# Altium footprint library AVP32F08_EVM_Rev1.1.PcbLib: 50 footprints (part 2 of 4)
Each footprint in its own frame and in the unit in brackets; x right, y up, seen from the top. Pads: shape width x height; smd on the part's side, far side on the other; paste and mask are expansions set on the pad; w line width, h text height; cw(c..) or ccw(c..) is an arc to the next point about the centre after c.
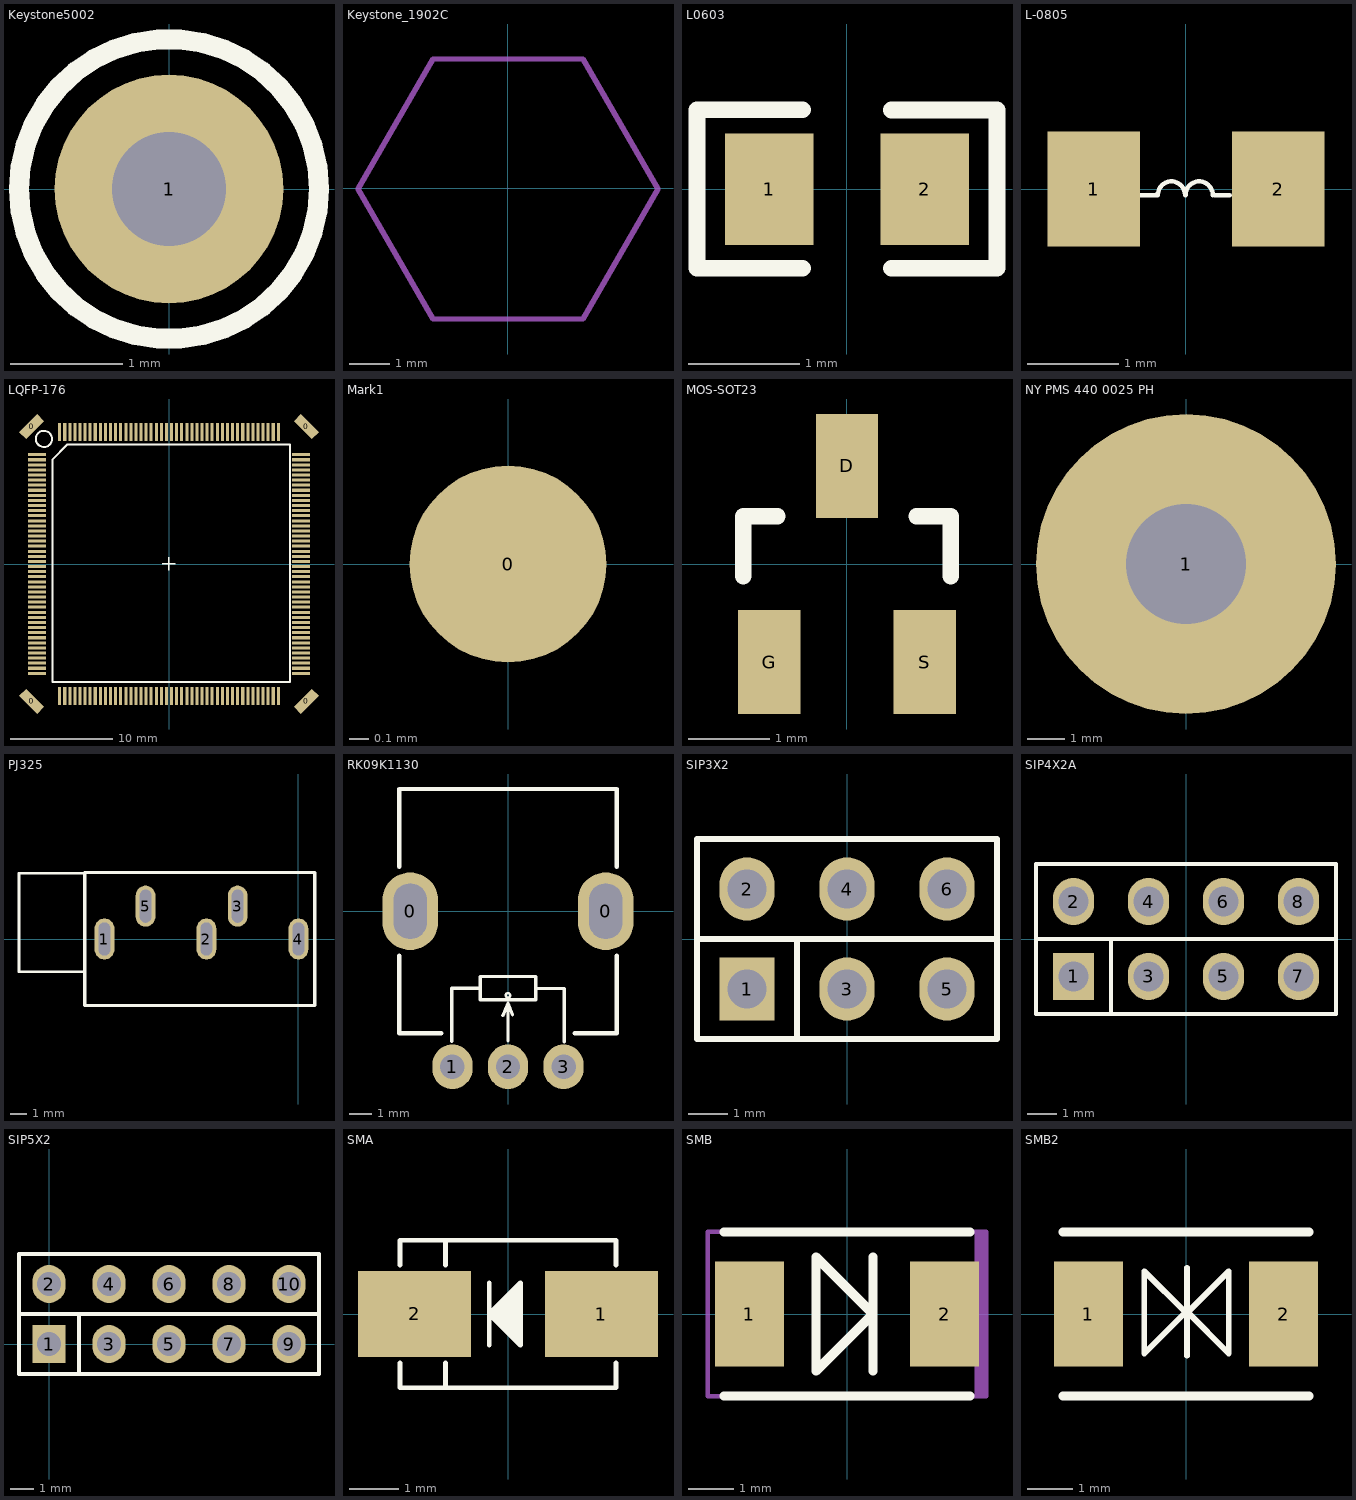
[diagram p1: the footprints below, top view; thin cyan lines are the x and y axes]

## Keystone5002 [mil] "测试点"
pads (1):
  round 80 hole 40: 1(0,0)
Top Overlay:
  circle w7: c0,0 r52.5
Mechanical 5:
  circle w3.94: c0,0 r52.5
3D body "Keystone_5002.stp": height 181.97, standoff -118.11, extent -49.23,-49 49,49.04

## Keystone_1902C [mil] "Hex Standoff, 4-40 threaded, nylon"
height 500
pads (1):
  round 1 on Mech4: 0(0,0)
Mechanical 6:
  lines w5: -145.29,-0.49 -72.56,125.49 72.92,125.49 145.65,-0.49 72.92,-126.47 -72.56,-126.47 -145.29,-0.49
3D body "Keystone_1902C.stp": height 501, standoff 1, extent -144.95,-125.98 146,125.98

## L0603 [mm] "标准型 间距1.4mm  焊盘尺寸0.8/1mm"
pads (2):
  rect 0.8x1 smd mask+0.102: 1(-0.7,0) 2(0.7,0)
Top Overlay:
  lines w0.15: -0.4,-0.711 -1.35,-0.711 -1.35,0.716 -0.4,0.716 ; 0.4,-0.711 1.35,-0.711 1.35,0.713 0.4,0.713
3D body "User Library-V0603HD.STEP": height 0.9, standoff 0, extent -0.775,-0.4 0.825,0.4

## L-0805 [mil] "标准型  间距40mil 电感"
height 196.85
pads (2):
  rect 40x50 smd: 1(-40,0) 2(40,0)
Top Overlay:
  lines w1.97: -20,-2.61 -13,-2.61 ; -12.22,-2.62 cw(c-6.32,-2.62) -0.41,-2.62 ; -0.22,-2.62 cw(c5.68,-2.62) 11.59,-2.62 ; 12.53,-2.61 19,-2.61
3D body "User Library-Ferrite Beads(BLM21PG221SZ1D).step": height 36.42, standoff 2.95, extent -39.36,-25.6 39.37,23.61

## LQFP-176 [mm] "0.5mm pitch"
pads (180):
  rect 2.5x1 smd rot 135: 0(-13.5,-13.5) 0(13.5,13.5)
  rect 2.5x1 smd rot 45: 0(-13.5,13.5) 0(13.5,-13.5)
  rect 1.778x0.3 smd mask+0.05: 1(-13,10.75) 2(-13,10.25) 3(-13,9.75) 4(-13,9.25) 5(-13,8.75) 6(-13,8.25) 7(-13,7.75) 8(-13,7.25) 9(-13,6.75) 10(-13,6.25) 11(-13,5.75) 12(-13,5.25) 13(-13,4.75) 14(-13,4.25) 15(-13,3.75) 16(-13,3.25) 17(-13,2.75) 18(-13,2.25) 19(-13,1.75) 20(-13,1.25) 21(-13,0.75) 22(-13,0.25) 23(-13,-0.25) 24(-13,-0.75) 25(-13,-1.25) 26(-13,-1.75) 27(-13,-2.25) 28(-13,-2.75) 29(-13,-3.25) 30(-13,-3.75) 31(-13,-4.25) 32(-13,-4.75) 33(-13,-5.25) 34(-13,-5.75) 35(-13,-6.25) 36(-13,-6.75) 37(-13,-7.25) 38(-13,-7.75) 39(-13,-8.25) 40(-13,-8.75) 41(-13,-9.25) 42(-13,-9.75) 43(-13,-10.25) 44(-13,-10.75) 89(13,-10.75) 90(13,-10.25) 91(13,-9.75) 92(13,-9.25) 93(13,-8.75) 94(13,-8.25) 95(13,-7.75) 96(13,-7.25) 97(13,-6.75) 98(13,-6.25) 99(13,-5.75) 100(13,-5.25) 101(13,-4.75) 102(13,-4.25) 103(13,-3.75) 104(13,-3.25) 105(13,-2.75) 106(13,-2.25) 107(13,-1.75) 108(13,-1.25) 109(13,-0.75) 110(13,-0.25) 111(13,0.25) 112(13,0.75) 113(13,1.25) 114(13,1.75) 115(13,2.25) 116(13,2.75) 117(13,3.25) 118(13,3.75) 119(13,4.25) 120(13,4.75) 121(13,5.25) 122(13,5.75) 123(13,6.25) 124(13,6.75) 125(13,7.25) 126(13,7.75) 127(13,8.25) 128(13,8.75) 129(13,9.25) 130(13,9.75) 131(13,10.25) 132(13,10.75)
  rect 0.3x1.778 smd mask+0.05: 45(-10.75,-13) 46(-10.25,-13) 47(-9.75,-13) 48(-9.25,-13) 49(-8.75,-13) 50(-8.25,-13) 51(-7.75,-13) 52(-7.25,-13) 53(-6.75,-13) 54(-6.25,-13) 55(-5.75,-13) 56(-5.25,-13) 57(-4.75,-13) 58(-4.25,-13) 59(-3.75,-13) 60(-3.25,-13) 61(-2.75,-13) 62(-2.25,-13) 63(-1.75,-13) 64(-1.25,-13) 65(-0.75,-13) 66(-0.25,-13) 67(0.25,-13) 68(0.75,-13) 69(1.25,-13) 70(1.75,-13) 71(2.25,-13) 72(2.75,-13) 73(3.25,-13) 74(3.75,-13) 75(4.25,-13) 76(4.75,-13) 77(5.25,-13) 78(5.75,-13) 79(6.25,-13) 80(6.75,-13) 81(7.25,-13) 82(7.75,-13) 83(8.25,-13) 84(8.75,-13) 85(9.25,-13) 86(9.75,-13) 87(10.25,-13) 88(10.75,-13) 133(10.75,13) 134(10.25,13) 135(9.75,13) 136(9.25,13) 137(8.75,13) 138(8.25,13) 139(7.75,13) 140(7.25,13) 141(6.75,13) 142(6.25,13) 143(5.75,13) 144(5.25,13) 145(4.75,13) 146(4.25,13) 147(3.75,13) 148(3.25,13) 149(2.75,13) 150(2.25,13) 151(1.75,13) 152(1.25,13) 153(0.75,13) 154(0.25,13) 155(-0.25,13) 156(-0.75,13) 157(-1.25,13) 158(-1.75,13) 159(-2.25,13) 160(-2.75,13) 161(-3.25,13) 162(-3.75,13) 163(-4.25,13) 164(-4.75,13) 165(-5.25,13) 166(-5.75,13) 167(-6.25,13) 168(-6.75,13) 169(-7.25,13) 170(-7.75,13) 171(-8.25,13) 172(-8.75,13) 173(-9.25,13) 174(-9.75,13) 175(-10.25,13) 176(-10.75,13)
Top Overlay:
  circle w0.2: c-12.3,12.3 r0.8
  lines w0.127: -0.641,0.006 0.629,0.006 ; -0.006,-0.629 -0.006,0.641
  lines w0.203: -11.476,-11.602 -11.476,10.266 -9.976,11.766 11.892,11.766 11.892,-11.602 -11.476,-11.602
3D body "User Library-LQFP176-0_5.STEP": height 1.55, standoff -0.02, extent -12.903,-12.878 12.869,12.894

## Mark1 [mm] "基准点 无边框"
pads (1):
  round 1 all layers, no hole: 0(0,0)
Top Solder:
  circle w0.5: c0,0 r0.762
Bottom Solder:
  circle w0.5: c0,0 r0.762

## MOS-SOT23 [mm] "焊盘加长型"
height 2
pads (3):
  rect 0.762x1.27 smd: D(0,1.2) G(-0.95,-1.2) S(0.95,-1.2)
Top Overlay:
  lines w0.2: -1.27,-0.15 -1.27,0.584 -0.85,0.584 ; 0.85,0.584 1.27,0.584 1.27,-0.15
3D body "SOT-23-3.STEP": height 1.2, standoff 0, extent -1.45,-1.502 1.45,1.298

## NY PMS 440 0025 PH [mm] "4-40 nylon screw and mounting hole"
height 1.905
pads (1):
  round 8 hole 3.2: 1(0,0)
Mechanical 5:
  circle w0.127: c0,0 r3.789
3D body "B_F_NY PMS 440 0025 PH.stp": height 2.69, standoff -8.74, extent -3.302,-3.3 3.296,3.3

## PJ325 [mm]
height 1.2
pads (5):
  oval 1.2x2.5 hole 0.7 slot 2 at 90 deg: 1(-11.8,0) 2(-5.6,0) 3(-3.7,2) 4(0,0) 5(-9.3,2)
Top Overlay:
  lines w0.152: -13,-2 -17,-2 -17,4 -13,4
  lines w0.203: -13,-4.05 1,-4.05 1,4.05 -13,4.05 -13,-4.05
3D body "sj-3598.stp": height 13.3, standoff -2.5, extent -17.392,-4.259 0.97,4.041

## RK09K1130 [mm] "立式可调电位器"
height 9.5
pads (5):
  oval 2.5x3.5 hole 1.5 slot 2.5 at 90 deg: 0(-4.4,0) 0(4.4,0)
  oval 1.8x2 hole 1.1: 1(-2.5,-7) 2(0,-7) 3(2.5,-7)
Top Overlay:
  circle w0.1: c-0.002,-3.784 r0.1
  lines w0.15: -2.525,-5.857 -2.525,-3.469 -1.247,-3.469 -1.247,-2.941 1.243,-2.941 1.243,-3.982 -1.247,-3.982 -1.247,-3.474 ; -0.231,-4.693 -0.002,-4.135 ; -0.002,-5.836 -0.002,-4.135 ; 0.201,-4.668 -0.002,-4.135 ; 1.243,-3.474 2.538,-3.474 ; 2.529,-5.882 2.529,-3.495
  lines w0.2: -4.9,-2 -4.9,-5.5 -3,-5.5 ; -4.9,2 -4.9,5.5 4.863,5.5 4.877,5.486 4.886,5.486 4.9,5.5 4.9,2 ; 3,-5.5 4.9,-5.5 4.9,-2
3D body "User Library-RK09K1130-20-1.step": height 19.5, standoff -4.2, extent -5.698,-7.152 5.698,5.498

## SIP3X2 [mm]
pads (6):
  rect 1.4x1.6 hole 1: 1(-2.54,-1.27)
  oval 1.4x1.6 hole 1: 2(-2.54,1.27) 3(0,-1.27) 4(0,1.27) 5(2.54,-1.27) 6(2.54,1.27)
Top Overlay:
  lines w0.15: -1.27,-2.54 -1.27,0 ; -3.81,0 3.81,0 ; -3.81,0 -3.81,-2.54 3.81,-2.54 3.81,0 ; -3.81,0 -3.81,2.54 3.81,2.54 3.81,0 ; -3.81,0 3.81,0
3D body "Samtec-1.step": height 8.89, standoff -2.03, extent 1.265,-2.489 3.805,0.051
3D body "Samtec-1.step": height 8.89, standoff -2.03, extent -1.275,-2.489 1.265,0.051
3D body "Samtec-1.step": height 8.89, standoff -2.03, extent -3.764,-2.489 -1.224,0.051
3D body "Samtec-1.step": height 8.89, standoff -2.03, extent -3.764,0.051 -1.224,2.591
3D body "Samtec-1.step": height 8.89, standoff -2.03, extent -1.275,0.051 1.265,2.591
3D body "Samtec-1.step": height 8.89, standoff -2.03, extent 1.265,0.051 3.805,2.591

## SIP4X2A [mm]
pads (8):
  rect 1.4x1.6 hole 1: 1(-3.81,-1.27)
  oval 1.4x1.6 hole 1: 2(-3.81,1.27) 3(-1.27,-1.27) 4(-1.27,1.27) 5(1.27,-1.27) 6(1.27,1.27) 7(3.81,-1.27) 8(3.81,1.27)
Top Overlay:
  lines w0.15: -2.54,-2.54 -2.54,0 ; 2.54,0 -5.08,0 ; -5.08,0 5.08,0 ; -5.08,0 -5.08,2.54 5.08,2.54 5.08,0 ; -5.08,0 -5.08,-2.54 5.08,-2.54 5.08,0
3D body "Samtec-1.step": height 8.89, standoff -2.03, extent 0.051,-0.101 2.591,2.439
3D body "Samtec-1.step": height 8.89, standoff -2.03, extent -2.489,-0.101 0.051,2.439
3D body "Samtec-1.step": height 8.89, standoff -2.03, extent -5.034,-0.101 -2.494,2.439
3D body "Samtec-1.step": height 8.89, standoff -2.03, extent -5.034,-2.591 -2.494,-0.051
3D body "Samtec-1.step": height 8.89, standoff -2.03, extent -2.489,-2.591 0.051,-0.051
3D body "Samtec-1.step": height 8.89, standoff -2.03, extent 0.051,-2.591 2.591,-0.051
3D body "Samtec-1.step": height 8.89, standoff -2.03, extent 2.591,-2.591 5.131,-0.051
3D body "Samtec-1.step": height 8.89, standoff -2.03, extent 2.591,-0.101 5.131,2.439

## SIP5X2 [mm]
pads (10):
  rect 1.4x1.6 hole 1: 1(0,0)
  oval 1.4x1.6 hole 1: 2(0,2.54) 3(2.54,0) 4(2.54,2.54) 5(5.08,0) 6(5.08,2.54) 7(7.62,0) 8(7.62,2.54) 9(10.16,0) 10(10.16,2.54)
Top Overlay:
  lines w0.15: 1.27,-1.27 1.27,1.27 ; -1.27,1.27 11.43,1.27 ; -1.27,1.27 -1.27,3.81 11.43,3.81 11.43,1.27 ; -1.27,1.27 -1.27,-1.27 11.43,-1.27 11.43,1.27 ; -1.27,1.27 11.43,1.27
3D body "Samtec-5.step": height 8.89, standoff -2.03, extent -1.27,1.27 11.43,3.81
3D body "Samtec-5.step": height 8.89, standoff -2.03, extent -1.27,-1.27 11.43,1.27

## SMA [mm] "DO-214AC"
height 8
pads (2):
  rect 2.3x1.75 smd: 1(1.9,0) 2(-1.9,0)
Top Overlay:
  lines w0.1: -2.2,-1 -2.2,-1.5 2.2,-1.5 2.2,-1 ; -2.2,1 -2.2,1.5 2.2,1.5 2.2,1 ; -1.27,-1.5 -1.27,-1 ; -1.27,1 -1.27,1.5 ; -0.381,-0.635 -0.381,0.635 ; -0.381,-0.025 -0.087,-0.025 ; -0.381,0.051 0.071,0.051 ; -0.193,-0.188 -0.193,0.188 ; -0.168,-0.213 -0.168,0.213 ; -0.087,-0.294 -0.087,0.294 ; -0.011,-0.37 -0.011,0.37 ; 0.049,-0.43 0.049,0.43 ; 0.096,-0.477 0.096,0.477 0.183,0.477 0.183,-0.564 ; -0.381,0 0.254,-0.635 0.254,0.635 -0.381,0
3D body "DO-214AC.STEP": height 2.4, standoff 0, extent -2.3,-1.372 2.3,1.328

## SMB [mm]
pads (2):
  rect 1.52x2.3 smd: 1(-2.14,0) 2(2.14,0)
Top Overlay:
  lines w0.2: -2.7,-1.8 2.7,-1.8 ; -2.7,1.8 2.7,1.8 ; 0.57,-1.25 0.57,1.25 ; -0.68,-1.25 -0.68,1.25 0.57,0 -0.68,-1.25
Mechanical 16:
  lines w0.1: 2.85,1.8 2.85,-1.8 2.95,-1.8 2.95,1.8 ; -3.05,-1.8 -3.05,1.8 3.05,1.8 3.05,-1.8 -3.05,-1.8
Mechanical 29:
  text ".designator" at -2.9,-0.55 h1.3
3D body "User Library-DO-214AA SMB.step": height 2.3, standoff 0, extent -2.7,-1.8 2.7,1.8

## SMB2 [mm] "双向TVS"
pads (2):
  rect 1.52x2.3 smd: 1(-2.14,0) 2(2.14,0)
Top Overlay:
  lines w0.127: 0,0.025 -0.914,0.94 -0.914,-0.864 0,0.051 ; 0.025,-0.914 0.025,1.016 ; 0.025,0.025 0.939,0.94 0.939,-0.864 0.025,0.051
  lines w0.2: -2.7,-1.8 2.7,-1.8 ; -2.7,1.8 2.7,1.8
3D body "User Library-DO-214AA SMB.step": height 2.3, standoff 0, extent -2.7,-1.8 2.7,1.8